# Altium footprint library Module.PcbLib: 88 footprints (part 2 of 6)
Each footprint in its own frame and in the unit in brackets; x right, y up, seen from the top. Pads: shape width x height; smd on the part's side, far side on the other; paste and mask are expansions set on the pad; w line width, h text height; cw(c..) or ccw(c..) is an arc to the next point about the centre after c.
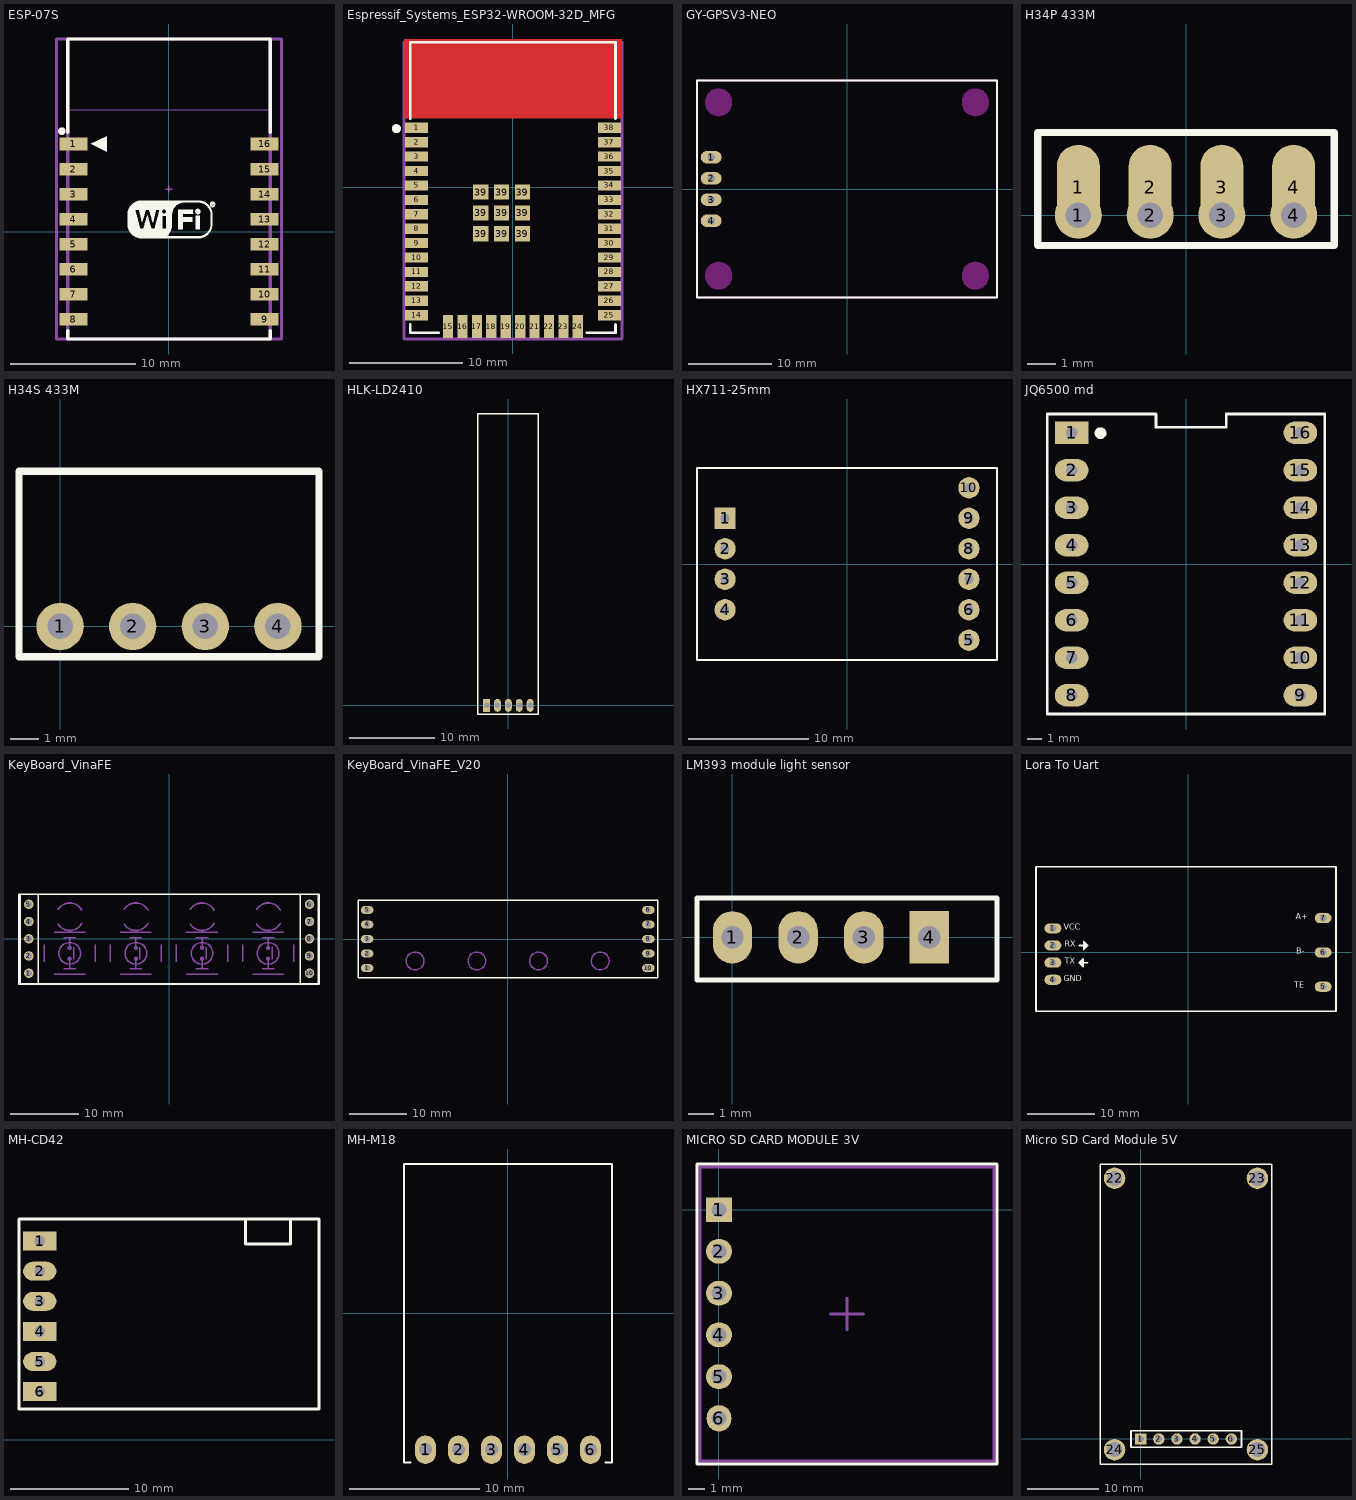
[diagram p1: the footprints below, top view; thin cyan lines are the x and y axes]

## ESP-07S [mm]
pads (16):
  rect 2.25x1 smd: 1(-7.625,7) 2(-7.625,5) 3(-7.625,3) 4(-7.625,1) 5(-7.625,-1) 6(-7.625,-3) 7(-7.625,-5) 8(-7.625,-7) 9(7.625,-7) 10(7.625,-5) 11(7.625,-3) 12(7.625,-1) 13(7.625,1) 14(7.625,3) 15(7.625,5) 16(7.625,7)
Top Overlay:
  drawing of 1268 lines, arcs and shapes, not listed
Top Designator:
  text ".Designator" at -3.711,3.057 h1.52
Mechanical 13:
  lines w0.051: -8.127,9.727 8.129,9.727 8.129,15.382 -8.127,15.382 -8.127,9.727
  lines w0.254: -8.084,-8.568 -8.084,15.371 8.084,15.371 8.084,-8.568 -8.084,-8.568
Mechanical 15:
  lines w0.1: -0.254,3.402 0.254,3.402 ; 0,3.148 0,3.656
  lines w0.254: -8.975,-8.568 8.975,-8.568 8.975,15.371 -8.975,15.371 -8.975,-8.568
3D body "User Library-ESP07-1.step": height 3.5, standoff -0.01, extent -7.972,-8.684 8.028,13.316

## Espressif_Systems_ESP32-WROOM-32D_MFG [mm]
pads (47):
  rect 2x0.9 smd paste+0 mask+0: 1(-8.5,5.26) 2(-8.5,3.99) 3(-8.5,2.72) 4(-8.5,1.45) 5(-8.5,0.18) 6(-8.5,-1.09) 7(-8.5,-2.36) 8(-8.5,-3.63) 9(-8.5,-4.9) 10(-8.5,-6.17) 11(-8.5,-7.44) 12(-8.5,-8.71) 13(-8.5,-9.98) 14(-8.5,-11.25) 25(8.5,-11.25) 26(8.5,-9.98) 27(8.5,-8.71) 28(8.5,-7.44) 29(8.5,-6.17) 30(8.5,-4.9) 31(8.5,-3.63) 32(8.5,-2.36) 33(8.5,-1.09) 34(8.5,0.18) 35(8.5,1.45) 36(8.5,2.72) 37(8.5,3.99) 38(8.5,5.26)
  rect 0.9x2 smd paste+0 mask+0: 15(-5.715,-12.25) 16(-4.445,-12.25) 17(-3.175,-12.25) 18(-1.905,-12.25) 19(-0.635,-12.25) 20(0.635,-12.25) 21(1.905,-12.25) 22(3.175,-12.25) 23(4.445,-12.25) 24(5.715,-12.25)
  rect 1.33x1.33 smd paste+0 mask+0: 39(-2.835,-4.075) 39(-2.835,-2.24) 39(-2.835,-0.405) 39(-1,-4.075) 39(-1,-2.24) 39(-1,-0.405) 39(0.835,-4.075) 39(0.835,-2.24) 39(0.835,-0.405)
Top Layer:
  pour cut-out: -9.6,6.085 9.6,6.085 9.6,13.085 -9.6,13.085
Top Overlay:
  circle w0.4: c-10.275,5.185 r0.2
  lines w0.254: -9.05,-12.075 -9.05,-12.8 -6.54,-12.8 ; -9.05,6.085 -9.05,12.8 9.05,12.8 9.05,6.085 ; 6.54,-12.8 9.05,-12.8 9.05,-12.075
Top Designator:
  lines w0.254: -9.6,-13.35 -9.6,12.8 9.6,12.8 9.6,-13.35 -9.6,-13.35
  text ".Designator" at -4.869,-0.452 h2
3D body "UNK_Espressif_Systems_ESP32-WROOM-32D_eec.STEP": height 3.2, standoff 0, extent -9,-12.75 9,12.75

## GY-GPSV3-NEO [mm]
pads (4):
  oval 2.5x1.5 hole 0.9: 1(-16.3,3.81) 2(-16.3,1.27) 3(-16.3,-1.27) 4(-16.3,-3.81)
Top Overlay:
  lines w0.254: -18,-13 -18,13 18,13 18,-13 -18,-13
Keep-Out Layer:
  board cut-out: -15.4,-12 -15.558,-12 -15.867,-11.939 -16.158,-11.818 -16.42,-11.643 -16.643,-11.42 -16.818,-11.158 -16.939,-10.867 -17,-10.558 -17,-10.4 -17,-10.242 -16.939,-9.933 -16.818,-9.642 -16.643,-9.38 -16.42,-9.157 -16.158,-8.982 -15.867,-8.861 -15.558,-8.8 -15.4,-8.8 -15.242,-8.8 -14.933,-8.861 -14.642,-8.982 -14.38,-9.157 -14.157,-9.38 -13.982,-9.642 -13.861,-9.933 -13.8,-10.242 -13.8,-10.4 -13.8,-10.558 -13.861,-10.867 -13.982,-11.158 -14.157,-11.42 -14.38,-11.643 -14.642,-11.818 -14.933,-11.939 -15.242,-12
  board cut-out: 17,-10.4 17,-10.558 16.939,-10.867 16.818,-11.158 16.643,-11.42 16.42,-11.643 16.158,-11.818 15.867,-11.939 15.558,-12 15.4,-12 15.242,-12 14.933,-11.939 14.642,-11.818 14.38,-11.643 14.157,-11.42 13.982,-11.158 13.861,-10.867 13.8,-10.558 13.8,-10.4 13.8,-10.242 13.861,-9.933 13.982,-9.642 14.157,-9.38 14.38,-9.157 14.642,-8.982 14.933,-8.861 15.242,-8.8 15.4,-8.8 15.558,-8.8 15.867,-8.861 16.158,-8.982 16.42,-9.157 16.643,-9.38 16.818,-9.642 16.939,-9.933 17,-10.242
  board cut-out: -17,10.4 -17,10.558 -16.939,10.867 -16.818,11.158 -16.643,11.42 -16.42,11.643 -16.158,11.818 -15.867,11.939 -15.558,12 -15.4,12 -15.242,12 -14.933,11.939 -14.642,11.818 -14.38,11.643 -14.157,11.42 -13.982,11.158 -13.861,10.867 -13.8,10.558 -13.8,10.4 -13.8,10.242 -13.861,9.933 -13.982,9.642 -14.157,9.38 -14.38,9.157 -14.642,8.982 -14.933,8.861 -15.242,8.8 -15.4,8.8 -15.558,8.8 -15.867,8.861 -16.158,8.982 -16.42,9.157 -16.643,9.38 -16.818,9.642 -16.939,9.933 -17,10.242
  board cut-out: 15.4,12 15.558,12 15.867,11.939 16.158,11.818 16.42,11.643 16.643,11.42 16.818,11.158 16.939,10.867 17,10.558 17,10.4 17,10.242 16.939,9.933 16.818,9.642 16.643,9.38 16.42,9.157 16.158,8.982 15.867,8.861 15.558,8.8 15.4,8.8 15.242,8.8 14.933,8.861 14.642,8.982 14.38,9.157 14.157,9.38 13.982,9.642 13.861,9.933 13.8,10.242 13.8,10.4 13.8,10.558 13.861,10.867 13.982,11.158 14.157,11.42 14.38,11.643 14.642,11.818 14.933,11.939 15.242,12
Keep-Out Layer:
  circle w0.15: c-15.4,-10.4 r1.6
  circle w0.15: c15.4,-10.4 r1.6
  circle w0.15: c-15.4,10.4 r1.6
  circle w0.15: c15.4,10.4 r1.6
Top Designator:
  text ".Designator" at -3.711,-0.344 h1.52
Mechanical 12:
  text ".Designator" at -7.303,-0.677 h3
Mechanical 15:
  lines w0.254: -18,-13 -18,13 18,13 18,-13 -18,-13
3D body "NEO-6M.STEP": height 21.19, standoff 9.25, extent -17.78,-13.17 17.78,13.17
3D body "pin_header_aw140-eg-g02a.stp": height 14.88, standoff 2.48, extent -17.55,-5.08 -15.05,-0.1
3D body "pin_header_aw140-eg-g02a.stp": height 14.88, standoff 2.48, extent -17.55,0 -15.05,4.98
3D body "female_header_a-bl254-eg-g04d.stp": height 8.5, standoff -3.2, extent -17.55,-5.205 -15.05,5.205

## H34P 433M [mm]
pads (8):
  round 1.66 hole 0.9: 1(-3.81,0) 2(-1.27,0) 3(1.27,0) 4(3.81,0)
  oval 1.524x3 smd: 1(-3.81,1) 2(-1.27,1) 3(1.27,1) 4(3.81,1)
Top Overlay:
  lines w0.254: -5.25,-1.067 -5.25,2.933 5.25,2.933 5.25,-1.067 -5.25,-1.067
Top Designator:
  text ".Designator" at -3.711,0.589 h1.52
3D body: height 11, standoff 0, extent -5.25,1 5.25,2.904

## H34S 433M [mm]
pads (4):
  round 1.66 hole 0.9: 1(0,0) 2(2.54,0) 3(5.08,0) 4(7.62,0)
Top Overlay:
  lines w0.254: -1.44,-1.067 9.06,-1.067 9.06,5.433 -1.44,5.433 -1.44,-1.067
Top Designator:
  text ".Designator" at 0.099,1.839 h1.52
Multi-Layer:
  pour cut-out: -1.44,1.016 -1.44,5.433 9.06,5.433 9.06,1.016
3D body: height 2, standoff 0, extent -1.44,-1.067 9.06,5.433

## HLK-LD2410 [mm]
pads (5):
  rect 0.8x1.5 hole 0.65: 1(-2.54,0)
  oval 0.8x1.5 hole 0.65: 2(-1.27,0) 3(0,0) 4(1.27,0) 5(2.54,0)
Top Overlay:
  lines w0.15: -3.54,-1 -3.54,34 3.46,34 3.46,-1 -3.54,-1
Top Designator:
  text ".Designator" at -3.751,16.156 h1.52

## HX711-25mm [mil] "HX711-Module-25mm"
pads (10):
  rect 70x70 hole 30: 1(-400,150)
  round 70 hole 30: 2(-400,50) 3(-400,-50) 4(-400,-150) 5(400,-250) 6(400,-150) 7(400,-50) 8(400,50) 9(400,150) 10(400,250)
Top Overlay:
  lines w7.87: -492.13,-314.96 -492.13,314.96 492.13,314.96 492.13,-314.96 -492.13,-314.96
Top Designator:
  text ".Designator" at -146.1,-13.55 h60
3D body "HX711 (2).step": height 366.64, standoff -176.67, extent -464.57,-303.15 464.57,303.15

## JQ6500 md [mil] "16 P"
height 100
pads (16):
  rect 90x60 hole 31: 1(-305,350)
  oval 90x60 hole 31: 2(-305,250) 3(-305,150) 4(-305,50) 5(-305,-50) 6(-305,-150) 7(-305,-250) 8(-305,-350) 9(305,-350) 10(305,-250) 11(305,-150) 12(305,-50) 13(305,50) 14(305,150) 15(305,250) 16(305,350)
Top Overlay:
  circle w15: c-228,349 r8
  lines w7: -370,-400 -370,400 -205,400 -80,400 -80,365 107.36,365 107.36,400 370,400 370,-400 -370,-400
Top Designator:
  text ".Designator" at -146.1,-3.48 h60
3D body: height 393.7, standoff 334.65, extent 255,-400 355,-300
3D body: height 393.7, standoff 334.65, extent 255,-300 355,-200
3D body: height 393.7, standoff 334.65, extent 255,-200 355,-100
3D body: height 393.7, standoff 334.65, extent 255,-100 355,0
3D body: height 393.7, standoff 334.65, extent 255,0 355,100
3D body: height 393.7, standoff 334.65, extent 255,100 355,200
3D body: height 393.7, standoff 334.65, extent 255,200 355,300
3D body: height 393.7, standoff 334.65, extent 255,300 355,400
3D body: height 472.44, standoff 157.48, extent 289.54,33.88 321.04,65.37
3D body: height 472.44, standoff 157.48, extent 289.54,-66.12 321.04,-34.63
3D body: height 472.44, standoff 157.48, extent 289.54,-166.12 321.04,-134.63
3D body: height 472.44, standoff 157.48, extent 289.54,-266.12 321.04,-234.63
3D body: height 472.44, standoff 157.48, extent 289.54,-366.12 321.04,-334.63
3D body: height 472.44, standoff 157.48, extent 289.54,333.88 321.04,365.37
3D body: height 472.44, standoff 157.48, extent 289.54,233.88 321.04,265.37
3D body: height 472.44, standoff 157.48, extent 289.54,133.88 321.04,165.37
3D body: height 393.7, standoff 334.65, extent -354.99,-400 -254.99,-300
3D body: height 393.7, standoff 334.65, extent -354.99,-300 -254.99,-200
3D body: height 393.7, standoff 334.65, extent -354.99,-200 -254.99,-100
3D body: height 393.7, standoff 334.65, extent -354.99,-100 -254.99,0
3D body: height 393.7, standoff 334.65, extent -354.99,0 -254.99,100
3D body: height 393.7, standoff 334.65, extent -354.99,100 -254.99,200
3D body: height 393.7, standoff 334.65, extent -354.99,200 -254.99,300
3D body: height 393.7, standoff 334.65, extent -354.99,300 -254.99,400
3D body: height 472.44, standoff 157.48, extent -320.45,33.88 -288.96,65.37
3D body: height 472.44, standoff 157.48, extent -320.45,-66.12 -288.96,-34.63
3D body: height 472.44, standoff 157.48, extent -320.45,-166.12 -288.96,-134.63
3D body: height 472.44, standoff 157.48, extent -320.45,-266.12 -288.96,-234.63
3D body: height 472.44, standoff 157.48, extent -320.45,-366.12 -288.96,-334.63
3D body: height 472.44, standoff 157.48, extent -320.45,333.88 -288.96,365.37
3D body: height 472.44, standoff 157.48, extent -320.45,233.88 -288.96,265.37
3D body: height 472.44, standoff 157.48, extent -320.45,133.88 -288.96,165.37
3D body "61300211821.stp": height 335.04, standoff -121.65, extent -354.21,190.15 -255.78,409.84
3D body "61300211821.stp": height 335.04, standoff -121.65, extent -354.21,-209.85 -255.78,9.84
3D body "61300211821.stp": height 335.04, standoff -121.65, extent -354.21,-409.85 -255.78,-190.16
3D body "61300211821.stp": height 335.04, standoff -121.65, extent 255.79,-409.85 354.22,-190.16
3D body "61300211821.stp": height 335.04, standoff -121.65, extent 255.79,-209.85 354.22,9.84
3D body "61300211821.stp": height 335.04, standoff -121.65, extent 255.79,-9.85 354.22,209.84
3D body "61300211821.stp": height 335.04, standoff -121.65, extent 255.79,190.15 354.22,409.84
3D body "61300211821.stp": height 335.04, standoff -121.65, extent -354.21,-9.85 -255.78,209.84
3D body: height 440.94, standoff 393.7, extent -370,-400 370,400
3D body "Micro USB.STP": height 550, standoff 434.25, extent -144.17,216.22 170,430

## KeyBoard_VinaFE [mm]
pads (10):
  round 1.4 / inner round 1.4 / far side oval 2.2x1.4 hole 1 mask+0.1: 1(-20.7,-5.08) 2(-20.7,-2.54) 3(-20.7,0) 4(-20.7,2.54) 5(-20.7,5.08) 6(20.7,5.08) 7(20.7,2.54) 8(20.7,0) 9(20.7,-2.54) 10(20.7,-5.08)
Top Overlay:
  lines w0.2: -22,-6.6 -22,6.6 -19.3,6.6 -19.3,-6.6 -22,-6.6 ; 19.3,-6.6 19.3,6.6 22,6.6 22,-6.6 19.3,-6.6
  lines w0.254: -22.15,-6.672 -22.15,6.578 22.1,6.578 22.1,-6.672 -22.15,-6.672
Top Designator:
  text ".Designator" at -3.736,-0.391 h1.52
Mechanical 15:
  circle w0.2: c-4.913,-1.35 r0.2
  circle w0.2: c-4.913,-2.95 r0.2
  circle w0.2: c-4.913,-2.15 r1.6
  circle w0.2: c14.6,-1.35 r0.2
  circle w0.2: c14.6,-2.95 r0.2
  circle w0.2: c14.6,-2.15 r1.6
  circle w0.2: c4.843,-1.35 r0.2
  circle w0.2: c4.843,-2.95 r0.2
  circle w0.2: c4.843,-2.15 r1.6
  circle w0.2: c-14.67,-1.35 r0.2
  circle w0.2: c-14.67,-2.95 r0.2
  circle w0.2: c-14.67,-2.15 r1.6
  lines w0.2: -18.441,-3.42 -18.441,-0.88 ; -16.97,-5.25 -12.37,-5.25 ; -16.97,0.95 -12.37,0.95 ; -15.559,-4.45 -13.781,-4.45 ; -15.559,0.15 -13.781,0.15 ; -14.67,-4.45 -14.67,-2.95 ; -14.67,-1.35 -14.67,0.15 ; -14.07,-3.05 -14.07,-1.25 ; -10.898,-3.42 -10.898,-0.88 ; -8.685,-3.42 -8.685,-0.88 ; -7.213,-5.25 -2.613,-5.25 ; -7.213,0.95 -2.613,0.95 ; -5.802,-4.45 -4.024,-4.45 ; -5.802,0.15 -4.024,0.15 ; -4.913,-4.45 -4.913,-2.95 ; -4.913,-1.35 -4.913,0.15 ; -4.313,-3.05 -4.313,-1.25 ; -1.142,-3.42 -1.142,-0.88 ; 1.072,-3.42 1.072,-0.88 ; 2.543,-5.25 7.143,-5.25 ; 2.543,0.95 7.143,0.95 ; 3.954,-4.45 5.732,-4.45 ; 3.954,0.15 5.732,0.15 ; 4.843,-4.45 4.843,-2.95 ; 4.843,-1.35 4.843,0.15 ; 5.443,-3.05 5.443,-1.25 ; 8.615,-3.42 8.615,-0.88 ; 10.829,-3.42 10.829,-0.88 ; 12.3,-5.25 16.9,-5.25 ; 12.3,0.95 16.9,0.95 ; 13.711,-4.45 15.489,-4.45 ; 13.711,0.15 15.489,0.15 ; 14.6,-4.45 14.6,-2.95 ; 14.6,-1.35 14.6,0.15 ; 15.2,-3.05 15.2,-1.25 ; 18.372,-3.42 18.372,-0.88
  lines w0.254: -16.384,2.159 ccw(c-14.67,3.25) -12.89,2.271 ; -16.384,4.341 cw(c-14.67,3.25) -12.886,4.223 ; -6.628,2.159 ccw(c-4.913,3.25) -3.133,2.271 ; -6.628,4.341 cw(c-4.913,3.25) -3.129,4.223 ; 3.129,2.159 ccw(c4.843,3.25) 6.624,2.271 ; 3.129,4.341 cw(c4.843,3.25) 6.627,4.223 ; 12.886,2.159 ccw(c14.6,3.25) 16.38,2.271 ; 12.886,4.341 cw(c14.6,3.25) 16.384,4.223
3D body "female_header_a-bl254-eg-g05d.stp": height 8.5, standoff -3.2, extent 19.45,-6.475 21.95,6.475
3D body "female_header_a-bl254-eg-g05d.stp": height 8.5, standoff -3.2, extent -21.95,-6.475 -19.45,6.475
3D body "VinaFE_KeyBoard_V10_pcb.step": height 17.78, standoff 2.46, extent -22.15,-6.672 22.1,6.578

## KeyBoard_VinaFE_V20 [mm]
pads (10):
  oval 2.2x1.4 hole 1: 1(-24.6,-5.08) 2(-24.6,-2.54) 3(-24.6,0) 4(-24.6,2.54) 5(-24.6,5.08) 6(24.6,5.08) 7(24.6,2.54) 8(24.6,0) 9(24.6,-2.54) 10(24.6,-5.08)
Top Overlay:
  lines w0.254: -26.2,-6.75 26.3,-6.75 26.3,6.75 -26.2,6.75 -26.2,-6.75
Top Designator:
  text ".Designator" at -3.661,-0.344 h1.52
Mechanical 12:
  text "SW1" at 15.319,5.68 h1
  text "SW2" at 4.469,5.68 h1
  text "SW3" at -6.334,5.68 h1
  text "SW4" at -17.143,5.68 h1
  text "SW1" at -23.081,4.76 h1
  text "SW2" at -23.131,2.22 h1
  text "SW3" at -23.134,-0.32 h1
  text "SW4" at -23.143,-2.86 h1
  text "COM" at -23.191,-5.4 h1
Mechanical 15:
  circle w0.254: c16.2,-3.84 r1.55
  circle w0.254: c5.4,-3.84 r1.55
  circle w0.254: c-16.2,-3.84 r1.55
  circle w0.254: c-5.4,-3.84 r1.55
3D body "VinaFE_KeyBoard_V20_pcb.step": height 12.08, standoff -0.32, extent -26.2,-6.75 26.3,6.75

## LM393 module light sensor [mil]
pads (4):
  oval 60x80 hole 34: 1(0,0) 2(100,0) 3(200,0)
  rect 60x80 hole 34: 4(300,0)
Top Overlay:
  lines w7.87: -54,-65 403,-65 403,60 -54,60 -54,-65
Top Designator:
  text ".Designator" at 21.37,66.36 h60
3D body "Light sensor LM393 (1).STEP": height 1635.43, standoff -182.68, extent -112.06,-50.77 447,228.76

## Lora To Uart [mm]
pads (7):
  oval 2.5x1.5 hole 1 mask+0.1: 1(-20,3.56) 2(-20,1.02) 3(-20,-1.52) 4(-20,-4.06) 5(20,-5.08) 6(20,0) 7(20,5.08)
Top Overlay:
  region: -15.431,0.439 -14.856,1.014 -14.856,1.026 -15.431,1.601
  region: -15.5,-2.101 -16.075,-1.526 -16.075,-1.514 -15.5,-0.939
  lines w0.254: -16.075,-1.526 -15.5,-2.101 -15.5,-0.939 -16.075,-1.514 -15.55,-1.514 ; -16.075,1.02 -15.431,1.02 ; -15.5,-1.52 -14.856,-1.52 ; -15.381,1.026 -14.856,1.026 -15.431,1.601 -15.431,0.439 -14.856,1.014 ; -22.5,-8.72 -22.5,12.68 21.9,12.68 21.9,-8.72 -22.5,-8.72
  text "VCC" at -18.383,3.063 h1.5
  text "GND" at -18.427,-4.558 h1.5
  text "RX" at -18.244,0.54 h1.5
  text "TX" at -18.23,-2 h1.5
  text "A+" at 15.95,4.6 h1.5
  text "B-" at 16.053,-0.48 h1.5
  text "TE" at 15.753,-5.56 h1.5
Top Designator:
  text ".Designator" at -4.011,1.636 h1.52
3D body "Lora_Layout_Module_pcb.SLDPRT": height 18.1, standoff 2.38, extent -22.5,-8.72 21.9,12.68
3D body "female_header_a-bl254-eg-g02d.stp": height 8.5, standoff -3.2, extent -21.2,-0.375 -18.7,4.955
3D body "female_header_a-bl254-eg-g02d.stp": height 8.5, standoff -3.2, extent -21.2,-2.915 -18.7,2.415
3D body "female_header_a-bl254-eg-g02d.stp": height 8.5, standoff -3.2, extent -21.2,-5.455 -18.7,-0.125
3D body "female_header_a-bl254-eg-g03d.stp": height 8.5, standoff -3.2, extent 18.8,-1.395 21.3,6.475
3D body "female_header_a-bl254-eg-g03d.stp": height 8.5, standoff -3.2, extent 18.8,-6.475 21.3,1.395

## MH-CD42 [mm]
pads (6):
  rect 2.8x1.6 hole 0.9 mask+0.102: 1(8.55,16.75) 4(8.55,9.13) 6(8.55,4.05)
  oval 2.8x1.6 hole 0.9 mask+0.102: 2(8.55,14.21) 3(8.55,11.67) 5(8.55,6.59)
Top Overlay:
  lines w0.254: 25.9,18.6 25.9,16.5 29.7,16.5 29.7,18.6 ; 6.8,2.6 6.8,18.6 32.1,18.6 32.1,2.6 6.8,2.6
Top Designator:
  text ".Designator" at 15.739,10.256 h1.52

## MH-M18 [mm]
pads (6):
  oval 1.6x2.2 hole 1: 1(-6.35,-10.5) 2(-3.81,-10.5) 3(-1.27,-10.5) 4(1.27,-10.5) 5(3.81,-10.5) 6(6.35,-10.5)
Top Overlay:
  lines w0.15: -7.5,-11.5 -8,-11.5 -8,11.5 8,11.5 8,-11.5 7.5,-11.5
3D body "mh-m18.STEP": height 2.65, standoff 0.03, extent -8,-11.52 8,11.52

## MICRO SD CARD MODULE 3V [mm] "3.3V"
pads (6):
  rect 1.6x1.5 hole 0.9: 1(0,0)
  oval 1.6x1.5 hole 0.9: 2(0,-2.54) 3(0,-5.08) 4(0,-7.62) 5(0,-10.16)
  oval 1.5x1.6 hole 0.9: 6(0,-12.7)
Top Overlay:
  lines w0.178: -1.338,-15.478 16.918,-15.478 16.918,2.778 -1.338,2.778 ; -1.338,-15.478 -1.338,2.778
Top 3D Body:
  lines w0.178: -1.16,-15.3 16.74,-15.3 16.74,2.6 -1.16,2.6 -1.16,-15.3
Top Designator:
  lines w0.178: 6.79,-6.35 8.79,-6.35 ; 7.79,-7.31 7.79,-5.39
  text ".Designator" at 5.252,-6.694 h1.52
Mechanical 12:
  text "GND" at 2.54,-12.688 h1
  text "MISO" at 2.54,-10.148 h1
  text "CLK" at 2.54,-7.609 h1
  text "MOSI" at 2.54,-5.068 h1
  text "CS" at 2.54,-2.528 h1
  text "VCC" at 2.54,0.011 h1
3D body "pin_header_aw140-eg-g06d.stp": height 5.55, standoff -5.65, extent -1.249,-14.071 1.249,1.168
3D body "MicroSD Card Module - 1.stp": height 5.88, standoff 2.47, extent -1.272,-15.323 19.352,2.787

## Micro SD Card Module 5V [mm] "5V"
pads (10):
  rect 1.6x1.6 hole 0.9: 1(0,0)
  round 1.6 hole 0.9: 2(2.54,0) 3(5.08,0) 4(7.62,0) 5(10.16,0) 6(12.7,0)
  round 3 hole 2.1: 22(-3.65,36.5) 23(16.35,36.5) 24(-3.65,-1.5) 25(16.35,-1.5)
Top Overlay:
  lines w0.203: -5.65,-3.5 -5.65,38.5 18.35,38.5 18.35,-3.5 -5.65,-3.5
  lines w0.254: -1.35,-1.143 14.1,-1.143 14.1,1.143 -1.35,1.143 -1.35,-1.143
Top Designator:
  text ".Designator" at 2.639,17.156 h1.52
3D body "Product_TF Micro SD Card Memory Modul Arduino.STEP": height 13.1, standoff 1.64, extent -5.65,-3.4 18.35,38.4
3D body "Header-F-2.54X6.stp": height 8.6, standoff -3.1, extent -1.395,-1.25 14.095,1.25